# Altium schematic symbol library TPS259530DSGR.SchLib: 1 symbol
Pins are listed as number, name and electrical type; pins without a type are passive.

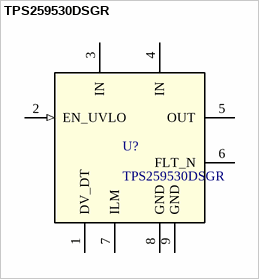
[diagram p0: symbol TPS259530DSGR]

## TPS259530DSGR
designator U?
2.7-V to 18-V, 34m&Omega;, 0.5-4A eFuse with over voltage protection in small WSON package 8-WSON -40 to 125; Manufacturer_Name: Texas Instruments; TYPE: TYPE; RefDes: RefDes; Copyright: Copyright (C) 2025 Ultra Librarian. All rights reserved.; Manufacturer_Part_Number: TPS259530DSGR
footprint DSG0008A
pins: 1 DV_DT, 2 EN_UVLO (in), 3 IN (power), 4 IN (power), 5 OUT (power), 6 FLT_N (oc), 7 ILM, 8 GND (power), 9 GND (power)